# EAGLE library part 6213XX21921_62134421921 (library WR-PHD)
WR-PHD 2.00 mm SMT Dual Pin Header Article Properties Pins 4 unitless; 6 unitless; 8 unitless; 10 unitless; 14 unitless; 16 unitless; 20 unitless; 24 unitless; 32 unitless; 44 unitless General Information Operating Temperature -40 °C up to +105 °C Compliance Lead free / RoHS Pitch 2 mm Durability 50 Cycles Rows Dual Gender Pin Header Type Straight Material Properties Insulator Material PA9T Insulator Flammability Rating UL94 V-0 Contact Material Copper Alloy Contact Plating Gold Contact Type Stamped Certification UL Approval E323964 Packaging Properties Packaging Tape and Reel with Cap; Tube Electrical Properties IR 2 A Withstanding Voltage 500 V (AC) Contact Resistance 20 mΩ RISO 1000 MΩ <https://www.we-online.com/components/media/o57941v209%20Family_WR-PHD_Dual_SMT_Pin_Header_621xxx21921.jpg> Details see: www.we-online.com/en/components/products/PHD_2_00_SMT_DUAL_PIN_HEADER_6210XX21921 <www.we-online.com/catalog/PHD_2_00_SMT_DUAL_PIN_HEADER_6210XX21921/?utm_source=eagle_model&utm_medium=description_link&utm_campaign=eisos_eagle> Updated by Ella 2024-01-31 2024 (C) Würth Elektronik
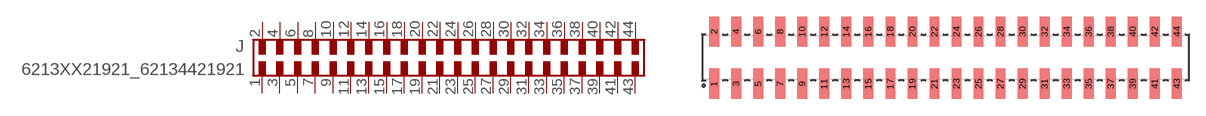
[diagram p294: symbol with the pads of 62134421921; footprint 62134421921]

Designator prefix J

## 6213XX21921_62134421921 (DATASHEET-URL: https://katalog.we-online.com/em/datasheet/62134421921.pdf; GENDER: Male; IR: 2A; MATES: WR-PHD 2.0mm Dual SMT Socket Header/ Socket Header(Reel)/ Socket Header Low Profile/Socket Header Low Profile(Reel)/Dual Socket Header; PACKAGING: Tape and Reel with Cap; PART-NUMBER: 62134421921; PINS: ; ROWS: Dual; TYPE: )  [62134421921]
1  1  pas
2  2  pas
3  3  pas
4  4  pas
5  5  pas
6  6  pas
7  7  pas
8  8  pas
9  9  pas
10  10  pas
11  11  pas
12  12  pas
13  13  pas
14  14  pas
15  15  pas
16  16  pas
17  17  pas
18  18  pas
19  19  pas
20  20  pas
21  21  pas
22  22  pas
23  23  pas
24  24  pas
25  25  pas
26  26  pas
27  27  pas
28  28  pas
29  29  pas
30  30  pas
31  31  pas
32  32  pas
33  33  pas
34  34  pas
35  35  pas
36  36  pas
37  37  pas
38  38  pas
39  39  pas
40  40  pas
41  41  pas
42  42  pas
43  43  pas
44  44  pas

## Footprint 62134421921 (pad centres in mm)
WR-PHD 2.00 mm SMD Dual Pin Header (Reel), 44 Pins
smd 0.89 x 2.75: 1 -21,-2.375; 2 -21,2.375; 3 -19,-2.375; 4 -19,2.375; 5 -17,-2.375; 6 -17,2.375; 7 -15,-2.375; 8 -15,2.375; 9 -13,-2.375; 10 -13,2.375; 11 -11,-2.375; 12 -11,2.375; 13 -9,-2.375; 14 -9,2.375; 15 -7,-2.375; 16 -7,2.375; 17 -5,-2.375; 18 -5,2.375; 19 -3,-2.375; 20 -3,2.375; 21 -1,-2.375; 22 -1,2.375; 23 1,-2.375; 24 1,2.375; 25 3,-2.375; 26 3,2.375; 27 5,-2.375; 28 5,2.375; 29 7,-2.375; 30 7,2.375; 31 9,-2.375; 32 9,2.375; 33 11,-2.375; 34 11,2.375; 35 13,-2.375; 36 13,2.375; 37 15,-2.375; 38 15,2.375; 39 17,-2.375; 40 17,2.375; 41 19,-2.375; 42 19,2.375; 43 21,-2.375; 44 21,2.375